# Altium footprint library Master.PcbLib: 178 footprints (part 2 of 12)
Each footprint in its own frame and in the unit in brackets; x right, y up, seen from the top. Pads: shape width x height; smd on the part's side, far side on the other; paste and mask are expansions set on the pad; w line width, h text height; cw(c..) or ccw(c..) is an arc to the next point about the centre after c.
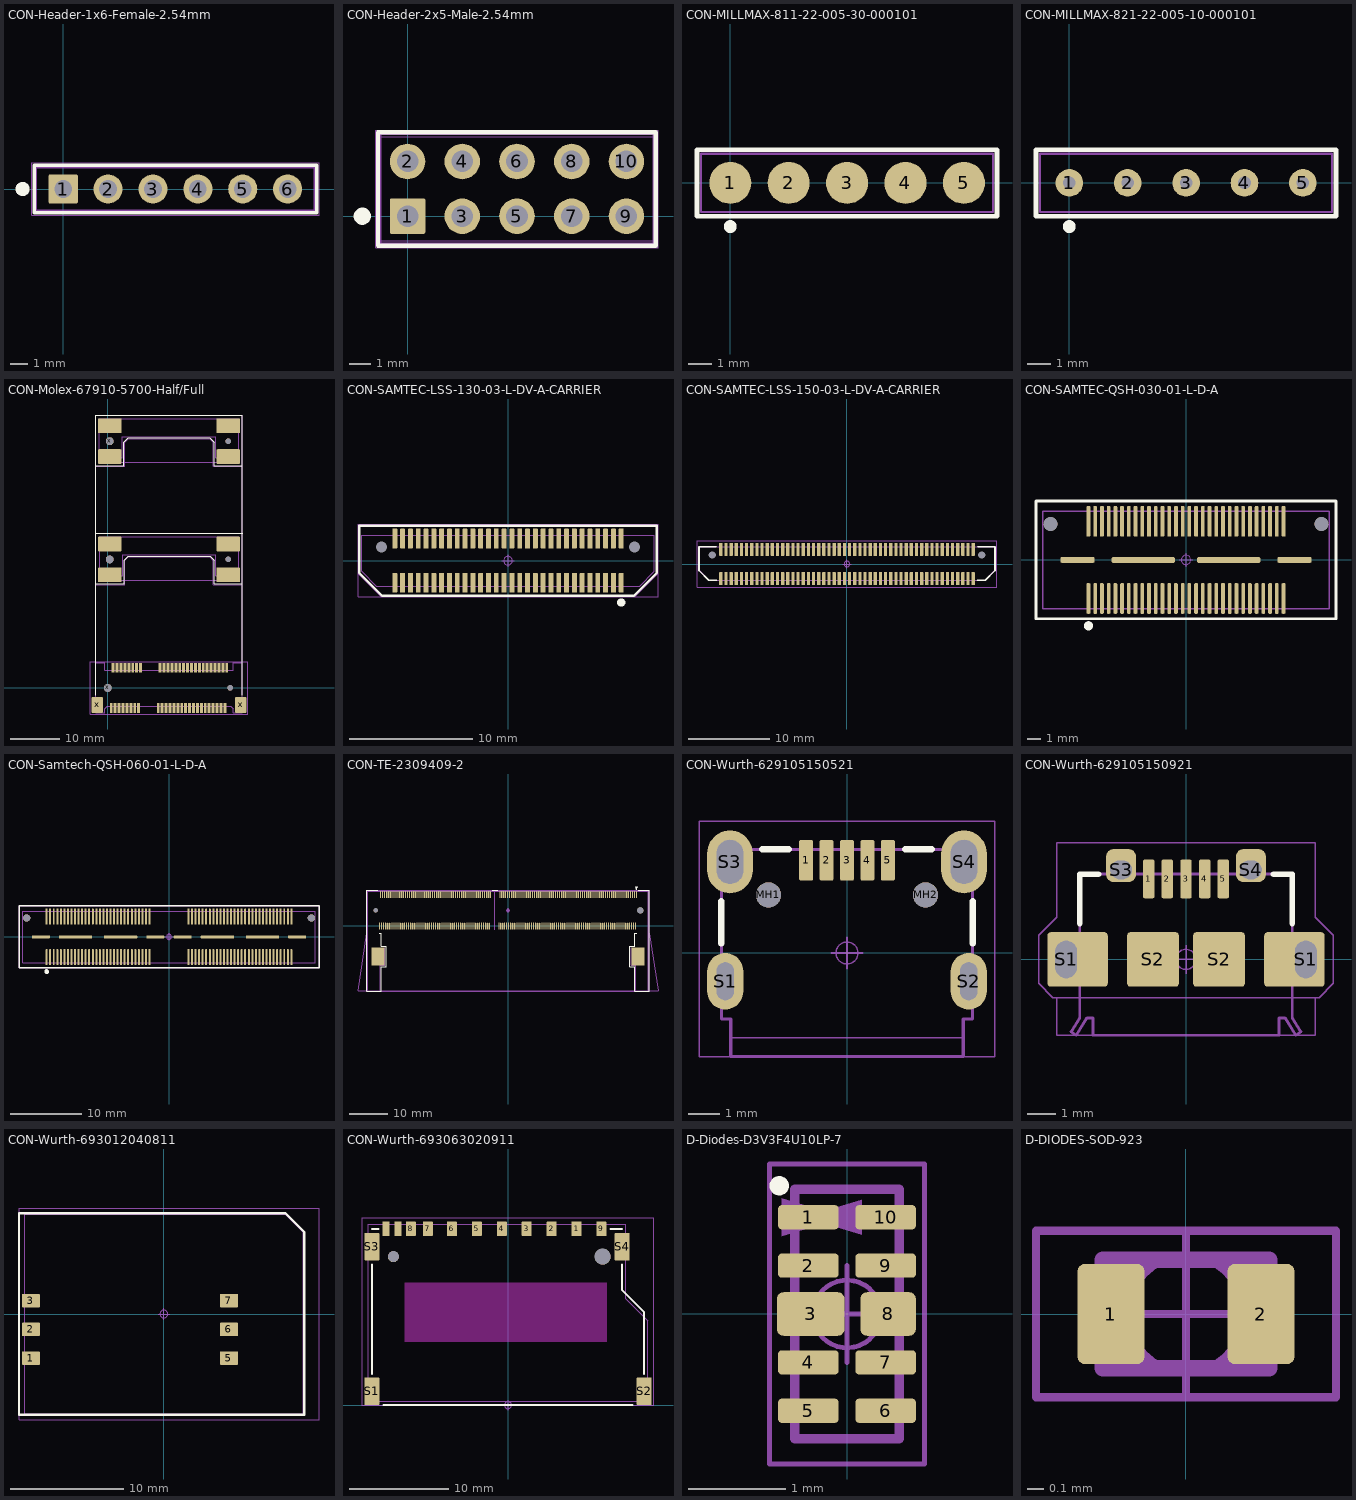
[diagram p1: the footprints below, top view; thin cyan lines are the x and y axes]

## CON-Header-1x6-Female-2.54mm [mm]
pads (6):
  rrect10% 1.65x1.65 hole 1: 1(0,0)
  round 1.65 hole 1: 2(2.54,0) 3(5.08,0) 4(7.62,0) 5(10.16,0) 6(12.7,0)
Top Overlay:
  circle w0.4: c-2.3,0 r0.2
  lines w0.2: -1.65,-1.355 14.35,-1.355 14.35,1.355 -1.65,1.355 -1.65,-1.355
Top Component Outline:
  lines w0.05: -1.775,-1.48 14.475,-1.48 14.475,1.48 -1.775,1.48 -1.775,-1.48
Top 3D Body:
  lines w0.01: -1.525,-1.205 -1.525,1.205 14.225,1.205 14.225,-1.205 -1.525,-1.205
Top Component Center:
  circle w0.05: c0,0 r0.35
  lines w0.05: -0.5,0 0.5,0 ; 0,-0.5 0,0.5
Top Dimensions:
  lines w0.1: -1.525,-1.205 -1.525,1.205 14.225,1.205 14.225,-1.205 -1.525,-1.205
Top Assembly:
  text ".Designator" at 4.7,1.75 h0.75
3D body "Samtec-SSW-106-01-G-S.step": height 8.52, standoff -2.63, extent -1.524,-1.206 14.224,1.207

## CON-Header-2x5-Male-2.54mm [mm] "2.54 mm header"
height 10.8
pads (10):
  rrect10% 1.65x1.65 hole 1: 1(0,0)
  round 1.65 hole 1: 2(0,2.54) 3(2.54,0) 4(2.54,2.54) 5(5.08,0) 6(5.08,2.54) 7(7.62,0) 8(7.62,2.54) 9(10.16,0) 10(10.16,2.54)
Top Overlay:
  circle w0.4: c-2.1,0 r0.2
  lines w0.2: -1.375,-1.375 -1.375,3.9 11.525,3.9 11.525,-1.375 -1.375,-1.375
Top Component Outline:
  lines w0.05: -1.475,-1.475 -1.475,4 11.625,4 11.625,-1.475 -1.475,-1.475
Top 3D Body:
  lines w0.001: -1.27,-1.14 -1.27,3.68 11.43,3.68 11.43,-1.14 -1.27,-1.14
Top Component Center:
  circle w0.05: c0,0 r0.35
  lines w0.05: -0.5,0 0.5,0 ; 0,-0.5 0,0.5
Top Dimensions:
  lines w0.1: -1.27,-1.27 -1.27,3.81 11.43,3.81 11.43,-1.27 -1.27,-1.27
Top Assembly:
  text ".Designator" at 3.391,1.1 h0.75
3D body "Samtec-TSW-105-07-G-D.step": height 8.4, standoff -2.52, extent -1.27,-1.27 11.43,3.81

## CON-MILLMAX-811-22-005-30-000101 [mm]
pads (5):
  round 1.83 smd: 1(0,0) 2(2.54,0) 3(5.08,0) 4(7.62,0) 5(10.16,0)
Top Overlay:
  circle w0.4: c0,-1.9 r0.08
  lines w0.2: -1.448,-1.448 -1.448,1.448 11.6,1.448 11.6,-1.448 -1.448,-1.448
Top Component Outline:
  lines w0.05: -1.448,-1.448 -1.448,1.448 11.6,1.448 11.6,-1.448 -1.448,-1.448
Top 3D Body:
  lines w0.01: -1.27,-1.27 11.43,-1.27 11.43,1.27 -1.27,1.27 -1.27,-1.27
Top Component Center:
  circle w0.05: c0,0 r0.35
  lines w0.05: -0.5,0 0.5,0 ; 0,-0.5 0,0.5
Top Dimensions:
  lines w0.1: -1.27,-1.27 11.43,-1.27 11.43,1.27 -1.27,1.27 -1.27,-1.27
Top Assembly:
  text ".Designator" at -0.483,1.803 h0.75
3D body "mill-max-811-22-005-30-000101.step": height 3.49, standoff 0.01, extent -1.27,-1.27 11.43,1.27

## CON-MILLMAX-821-22-005-10-000101 [mm]
pads (5):
  round 1.2 hole 0.55: 1(0,0) 2(2.54,0) 3(5.08,0) 4(7.62,0) 5(10.16,0)
Top Overlay:
  circle w0.4: c0,-1.9 r0.08
  lines w0.2: -1.448,-1.448 -1.448,1.448 11.6,1.448 11.6,-1.448 -1.448,-1.448
Top Component Outline:
  lines w0.1: -1.448,-1.448 -1.448,1.448 11.6,1.448 11.6,-1.448 -1.448,-1.448
Top 3D Body:
  lines w0.01: -1.27,-1.27 11.43,-1.27 11.43,1.27 -1.27,1.27 -1.27,-1.27
Top Component Center:
  circle w0.05: c0,0 r0.35
  lines w0.05: -0.5,0 0.5,0 ; 0,-0.5 0,0.5
Top Dimensions:
  lines w0.1: -1.27,-1.27 11.43,-1.27 11.43,1.27 -1.27,1.27 -1.27,-1.27
Top Assembly:
  text ".Designator" at -0.483,1.803 h0.75
3D body "mill-max-821-22-005-10-000101.STEP": height 3.49, standoff -1.74, extent -1.27,-1.27 11.43,1.27

## CON-Molex-67910-5700-Half/Full [mm]
pads (68):
  rrect12% 0.6x2 smd: 1(0.7,-4.1) 2(1.1,4.1) 3(1.5,-4.1) 4(1.9,4.1) 5(2.3,-4.1) 6(2.7,4.1) 7(3.1,-4.1) 8(3.5,4.1) 9(3.9,-4.1) 10(4.3,4.1) 11(4.7,-4.1) 12(5.1,4.1) 13(5.5,-4.1) 14(5.9,4.1) 15(6.3,-4.1) 16(6.7,4.1) 17(10.3,-4.1) 18(10.7,4.1) 19(11.1,-4.1) 20(11.5,4.1) 21(11.9,-4.1) 22(12.3,4.1) 23(12.7,-4.1) 24(13.1,4.1) 25(13.5,-4.1) 26(13.9,4.1) 27(14.3,-4.1) 28(14.7,4.1) 29(15.1,-4.1) 30(15.5,4.1) 31(15.9,-4.1) 32(16.3,4.1) 33(16.7,-4.1) 34(17.1,4.1) 35(17.5,-4.1) 36(17.9,4.1) 37(18.3,-4.1) 38(18.7,4.1) 39(19.1,-4.1) 40(19.5,4.1) 41(19.9,-4.1) 42(20.3,4.1) 43(20.7,-4.1) 44(21.1,4.1) 45(21.5,-4.1) 46(21.9,4.1) 47(22.3,-4.1) 48(22.7,4.1) 49(23.1,-4.1) 50(23.5,4.1) 51(23.9,-4.1) 52(24.3,4.1)
  rrect12% 2.3x3.2 smd: x(-2.15,-3.5) x(27.15,-3.5)
  round 1.6 hole 1.6 unplated: x(0,0) x(0.4,50.4) ""(0.4,26.25)
  round 1.1 hole 1.1 unplated: x(24.6,50.4) x(25,0) ""(24.6,26.25)
  rrect12% 4.8x3 smd: ""(0.4,23.1) ""(0.4,29.4) ""(0.4,47.25) ""(0.4,53.55) ""(24.6,23.1) ""(24.6,29.4) ""(24.6,47.25) ""(24.6,53.55)
Top Overlay:
  lines w0.2: -2.5,-1.5 -2.5,55.725 27.5,55.725 27.5,-1.5 ; -2.5,21.264 3.332,21.264 3.332,26.077 4.168,26.914 20.896,26.914 21.732,26.077 21.732,21.264 27.382,21.264 ; -2.468,31.589 27.532,31.589 ; -2.35,45.4 3.3,45.4 3.3,50.214 4.136,51.05 20.864,51.05 21.7,50.214 21.7,45.4 27.35,45.4
Top Component Outline:
  lines w0.05: -2.5,5.334 -2.5,45.25 ; -2.5,21.114 3.482,21.114 3.482,26.024 4.221,26.764 20.836,26.764 21.582,26.018 21.582,21.114 27.5,21.114 ; -2.5,31.591 27.5,31.591 ; 27.5,5.334 27.5,45.25 ; -2.5,45.25 -2.5,55.728 27.5,55.728 27.5,45.25 ; -2.5,45.25 3.45,45.25 3.45,50.161 4.189,50.9 20.804,50.9 21.55,50.154 21.55,45.25 27.5,45.25 ; -3.556,-5.334 28.575,-5.334 28.575,5.334 -3.556,5.334 -3.556,-5.334
Top 3D Body:
  lines w0.001: 0.9,47.05 0.9,46.24 2.5,46.24 2.5,47.05 ; 0.932,22.914 0.932,22.104 2.532,22.104 2.532,22.914 ; 22.5,47.05 22.5,46.24 24.1,46.24 24.1,47.05 ; 22.532,22.914 22.532,22.104 24.132,22.104 24.132,22.914 ; -2.5,5.1 -0.625,5.1 -0.625,3.6 25.625,3.6 25.625,5.1 ; -2.5,5.1 -2.5,5.1 ; -2.5,5.1 -2.5,-5.1 -0.625,-5.1 -0.625,-4.25 -0.125,-3.75 25.125,-3.75 25.625,-4.25 25.625,-5.1 27.5,-5.1 ; -1.725,47.05 3,47.05 3,51.33 22,51.33 22,47.05 26.725,47.05 ; -1.725,47.05 -1.725,55 26.725,55 26.725,47.05 ; -1.725,47.05 -1.725,46.09 26.725,46.09 26.725,47.05 ; -1.693,22.914 -1.693,21.954 26.757,21.954 26.757,22.914 ; -1.693,22.914 -1.693,30.864 26.757,30.864 26.757,22.914 ; -1.693,22.914 3.032,22.914 3.032,27.194 22.032,27.194 22.032,22.914 26.757,22.914 ; 25.625,5.1 27.5,5.1 27.5,-5.1 ; 25.625,5.1 25.625,5.1 ; 27.5,-5.1 27.5,-5.1
Top Component Center:
  circle w0.05: c0,0 r0.35
  lines w0.05: -0.5,0 0.5,0 ; 0,-0.5 0,0.5
Top Dimensions:
  lines w0.1: 0.9,47.05 0.9,46.24 2.5,46.24 2.5,47.05 ; 0.932,22.914 0.932,22.104 2.532,22.104 2.532,22.914 ; 22.5,47.05 22.5,46.24 24.1,46.24 24.1,47.05 ; 22.532,22.914 22.532,22.104 24.132,22.104 24.132,22.914 ; -2.5,5.1 -0.625,5.1 -0.625,3.6 25.625,3.6 25.625,5.1 ; -2.5,5.1 -2.5,-5.1 -0.625,-5.1 -0.625,-4.25 -0.125,-3.75 25.125,-3.75 25.625,-4.25 25.625,-5.1 27.5,-5.1 ; -2.5,5.1 -2.5,5.1 ; 25.625,5.1 27.5,5.1 27.5,-5.1 ; 25.625,5.1 25.625,5.1 ; 27.5,-5.1 27.5,-5.1 ; -1.725,47.05 3,47.05 3,51.33 22,51.33 22,47.05 26.725,47.05 26.725,55 -1.725,55 -1.725,47.05 ; -1.693,22.914 -1.693,30.864 26.757,30.864 26.757,22.914 22.032,22.914 22.032,27.194 3.032,27.194 3.032,22.914 -1.693,22.914
Top Assembly:
  text ".Designator" at -3.099,-5.944 h0.75
3D body "679105700.stp": height 5.77, standoff -0.73, extent -2.5,-5.1 27.5,5.1

## CON-SAMTEC-LSS-130-03-L-DV-A-CARRIER [mm] "0.635 mm Razor Beam High-Speed Hermaphroditic Terminal/Socket Strip"
height 5.49
pads (62):
  rrect20% 0.4x1.6 smd: 1(9.207,-1.8) 2(9.207,1.8) 3(8.572,-1.8) 4(8.572,1.8) 5(7.938,-1.8) 6(7.938,1.8) 7(7.302,-1.8) 8(7.302,1.8) 9(6.667,-1.8) 10(6.667,1.8) 11(6.032,-1.8) 12(6.032,1.8) 13(5.397,-1.8) 14(5.397,1.8) 15(4.763,-1.8) 16(4.763,1.8) 17(4.127,-1.8) 18(4.127,1.8) 19(3.492,-1.8) 20(3.492,1.8) 21(2.857,-1.8) 22(2.857,1.8) 23(2.222,-1.8) 24(2.222,1.8) 25(1.587,-1.8) 26(1.587,1.8) 27(0.953,-1.8) 28(0.953,1.8) 29(0.318,-1.8) 30(0.318,1.8) 31(-0.318,-1.8) 32(-0.318,1.8) 33(-0.953,-1.8) 34(-0.953,1.8) 35(-1.587,-1.8) 36(-1.587,1.8) 37(-2.222,-1.8) 38(-2.222,1.8) 39(-2.857,-1.8) 40(-2.857,1.8) 41(-3.492,-1.8) 42(-3.492,1.8) 43(-4.127,-1.8) 44(-4.127,1.8) 45(-4.763,-1.8) 46(-4.763,1.8) 47(-5.397,-1.8) 48(-5.397,1.8) 49(-6.032,-1.8) 50(-6.032,1.8) 51(-6.667,-1.8) 52(-6.667,1.8) 53(-7.302,-1.8) 54(-7.302,1.8) 55(-7.938,-1.8) 56(-7.938,1.8) 57(-8.572,-1.8) 58(-8.572,1.8) 59(-9.207,-1.8) 60(-9.207,1.8)
  round 0 hole 0.9 unplated mask+0.55: ""(-10.275,1.1) ""(10.275,1.1)
Top Overlay:
  circle w0.5: c9.2,-3.4 r0.088
  lines w0.2: -12.1,-1 -12.1,2.85 12.1,2.85 12.1,-1 10.246,-2.854 -10.246,-2.854 -12.1,-1
Top Component Outline:
  lines w0.05: -12.2,-1.05 -10.313,-2.937 ; 10.313,-2.937 12.2,-1.05 ; -12.2,-2.95 12.2,-2.95 12.2,2.95 -12.2,2.95 -12.2,-2.95
Top 3D Body:
  lines w0.001: -11.9,-0.87 -10.7,-2.07 10.7,-2.07 11.9,-0.87 11.9,2.07 -11.9,2.07 -11.9,-0.87
Top Component Center:
  circle w0.05: c0,0 r0.35
  lines w0.05: -0.5,0 0.5,0 ; 0,-0.5 0,0.5
Top Dimensions:
  lines w0.1: -11.9,-0.87 -10.7,-2.07 10.7,-2.07 11.9,-0.87 11.9,2.07 -11.9,2.07 -11.9,-0.87
Top Assembly:
  text ".Designator" at -1.689,-0.17 h0.75
3D body "LSS-130-03-L-DV-A.stp": height 5.46, standoff -0.84, extent -11.898,-2.3 11.903,2.3

## CON-SAMTEC-LSS-150-03-L-DV-A-CARRIER [mm] "0.635 mm Razor Beam High-Speed Hermaphroditic Terminal/Socket Strip"
height 5.49
pads (102):
  rrect20% 0.4x1.6 smd: 1(15.558,-1.8) 2(15.558,1.8) 3(14.923,-1.8) 4(14.923,1.8) 5(14.288,-1.8) 6(14.288,1.8) 7(13.653,-1.8) 8(13.653,1.8) 9(13.018,-1.8) 10(13.018,1.8) 11(12.383,-1.8) 12(12.383,1.8) 13(11.748,-1.8) 14(11.748,1.8) 15(11.113,-1.8) 16(11.113,1.8) 17(10.478,-1.8) 18(10.478,1.8) 19(9.843,-1.8) 20(9.843,1.8) 21(9.208,-1.8) 22(9.208,1.8) 23(8.573,-1.8) 24(8.573,1.8) 25(7.938,-1.8) 26(7.938,1.8) 27(7.303,-1.8) 28(7.303,1.8) 29(6.668,-1.8) 30(6.668,1.8) 31(6.033,-1.8) 32(6.033,1.8) 33(5.398,-1.8) 34(5.398,1.8) 35(4.763,-1.8) 36(4.763,1.8) 37(4.128,-1.8) 38(4.128,1.8) 39(3.493,-1.8) 40(3.493,1.8) 41(2.858,-1.8) 42(2.858,1.8) 43(2.223,-1.8) 44(2.223,1.8) 45(1.588,-1.8) 46(1.588,1.8) 47(0.953,-1.8) 48(0.953,1.8) 49(0.318,-1.8) 50(0.318,1.8) 51(-0.317,-1.8) 52(-0.317,1.8) 53(-0.952,-1.8) 54(-0.952,1.8) 55(-1.587,-1.8) 56(-1.587,1.8) 57(-2.222,-1.8) 58(-2.222,1.8) 59(-2.857,-1.8) 60(-2.857,1.8) 61(-3.492,-1.8) 62(-3.492,1.8) 63(-4.127,-1.8) 64(-4.127,1.8) 65(-4.762,-1.8) 66(-4.762,1.8) 67(-5.397,-1.8) 68(-5.397,1.8) 69(-6.032,-1.8) 70(-6.032,1.8) 71(-6.667,-1.8) 72(-6.667,1.8) 73(-7.302,-1.8) 74(-7.302,1.8) 75(-7.937,-1.8) 76(-7.937,1.8) 77(-8.572,-1.8) 78(-8.572,1.8) 79(-9.207,-1.8) 80(-9.207,1.8) 81(-9.842,-1.8) 82(-9.842,1.8) 83(-10.477,-1.8) 84(-10.477,1.8) 85(-11.112,-1.8) 86(-11.112,1.8) 87(-11.747,-1.8) 88(-11.747,1.8) 89(-12.382,-1.8) 90(-12.382,1.8) 91(-13.017,-1.8) 92(-13.017,1.8) 93(-13.652,-1.8) 94(-13.652,1.8) 95(-14.287,-1.8) 96(-14.287,1.8) 97(-14.922,-1.8) 98(-14.922,1.8) 99(-15.557,-1.8) 100(-15.557,1.8)
  round 0 hole 0.9 unplated mask+0.55: ""(-16.625,1.1) ""(16.625,1.1)
Top Overlay:
  lines w0.2: -18.25,2.14 -16.107,2.14 ; -18.235,2.14 -18.25,2.125 -18.25,-0.809 -17.059,-2 -16.1,-2 ; 16.1,-2 17.059,-2 18.25,-0.809 18.25,2.125 18.235,2.14 ; 16.108,2.14 18.25,2.14
Top Component Outline:
  lines w0.05: -18.5,-2.85 -18.5,2.85 18.5,2.85 18.5,-2.85 -18.5,-2.85
Top 3D Body:
  lines w0.001: -18.25,2.14 18.25,2.14 ; -18.25,2.14 18.25,2.14 ; -18.25,2.14 -18.25,-0.8 -17.05,-2 17.05,-2 18.25,-0.8 18.25,2.14
Top Component Center:
  circle w0.05: c0,0 r0.35
  lines w0.05: -0.5,0 0.5,0 ; 0,-0.5 0,0.5
Top Dimensions:
  lines w0.1: -18.25,2.14 18.25,2.14 ; -18.25,2.14 18.25,2.14 ; -18.25,2.14 -18.25,-0.8 -17.05,-2 17.05,-2 18.25,-0.8 18.25,2.14
Top Assembly:
  text ".Designator" at -1.689,-0.17 h0.75
3D body "LSS-150-03-L-DV-A.stp": height 5.31, standoff -0.99, extent -18.247,-2.3 18.253,2.3

## CON-SAMTEC-QSH-030-01-L-D-A [mm]
pads (66):
  rrect50% 0.28x2.27 smd: 1(-7.25,-2.865) 2(-7.25,2.865) 3(-6.75,-2.865) 4(-6.75,2.865) 5(-6.25,-2.865) 6(-6.25,2.865) 7(-5.75,-2.865) 8(-5.75,2.865) 9(-5.25,-2.865) 10(-5.25,2.865) 11(-4.75,-2.865) 12(-4.75,2.865) 13(-4.25,-2.865) 14(-4.25,2.865) 15(-3.75,-2.865) 16(-3.75,2.865) 17(-3.25,-2.865) 18(-3.25,2.865) 19(-2.75,-2.865) 20(-2.75,2.865) 21(-2.25,-2.865) 22(-2.25,2.865) 23(-1.75,-2.865) 24(-1.75,2.865) 25(-1.25,-2.865) 26(-1.25,2.865) 27(-0.75,-2.865) 28(-0.75,2.865) 29(-0.25,-2.865) 30(-0.25,2.865) 31(0.25,-2.865) 32(0.25,2.865) 33(0.75,-2.865) 34(0.75,2.865) 35(1.25,-2.865) 36(1.25,2.865) 37(1.75,-2.865) 38(1.75,2.865) 39(2.25,-2.865) 40(2.25,2.865) 41(2.75,-2.865) 42(2.75,2.865) 43(3.25,-2.865) 44(3.25,2.865) 45(3.75,-2.865) 46(3.75,2.865) 47(4.25,-2.865) 48(4.25,2.865) 49(4.75,-2.865) 50(4.75,2.865) 51(5.25,-2.865) 52(5.25,2.865) 53(5.75,-2.865) 54(5.75,2.865) 55(6.25,-2.865) 56(6.25,2.865) 57(6.75,-2.865) 58(6.75,2.865) 59(7.25,-2.865) 60(7.25,2.865)
  rrect50% 2.54x0.43 smd: 61(-8.065,0) 61(8.065,0)
  rrect50% 4.7x0.43 smd: 61(-3.175,0) 61(3.175,0)
  round 1.02 hole 1.02 unplated: ""(-10.065,2.67) ""(10.065,2.67)
Top Overlay:
  circle w0.5: c-7.25,-4.895 r0.088
  lines w0.2: -11.15,-4.38 11.15,-4.38 11.15,4.38 -11.15,4.38 -11.15,-4.38
Top Component Outline:
  lines w0.05: -11.15,-4.38 -11.15,4.38 11.15,4.38 11.15,-4.38 -11.15,-4.38
Top 3D Body:
  lines w0.01: -10.65,-3.62 10.65,-3.62 10.65,3.62 -10.65,3.62 -10.65,-3.62
Top Component Center:
  circle w0.05: c0,0 r0.35
  lines w0.05: -0.5,0 0.5,0 ; 0,-0.5 0,0.5
Top Dimensions:
  lines w0.1: -10.65,-3.62 -10.65,3.62 10.65,3.62 10.65,-3.62 -10.65,-3.62
Top Assembly:
  text ".Designator" at 8.527,-5.207 h0.75
3D body "QSH-030-01-L-D-A.stp": height 3.24, standoff -0.76, extent -10.65,-3.744 10.661,3.75

## CON-Samtech-QSH-060-01-L-D-A [mm]
pads (130):
  rrect50% 0.28x2.27 smd: 1(-17.25,-2.865) 2(-17.25,2.865) 3(-16.75,-2.865) 4(-16.75,2.865) 5(-16.25,-2.865) 6(-16.25,2.865) 7(-15.75,-2.865) 8(-15.75,2.865) 9(-15.25,-2.865) 10(-15.25,2.865) 11(-14.75,-2.865) 12(-14.75,2.865) 13(-14.25,-2.865) 14(-14.25,2.865) 15(-13.75,-2.865) 16(-13.75,2.865) 17(-13.25,-2.865) 18(-13.25,2.865) 19(-12.75,-2.865) 20(-12.75,2.865) 21(-12.25,-2.865) 22(-12.25,2.865) 23(-11.75,-2.865) 24(-11.75,2.865) 25(-11.25,-2.865) 26(-11.25,2.865) 27(-10.75,-2.865) 28(-10.75,2.865) 29(-10.25,-2.865) 30(-10.25,2.865) 31(-9.75,-2.865) 32(-9.75,2.865) 33(-9.25,-2.865) 34(-9.25,2.865) 35(-8.75,-2.865) 36(-8.75,2.865) 37(-8.25,-2.865) 38(-8.25,2.865) 39(-7.75,-2.865) 40(-7.75,2.865) 41(-7.25,-2.865) 42(-7.25,2.865) 43(-6.75,-2.865) 44(-6.75,2.865) 45(-6.25,-2.865) 46(-6.25,2.865) 47(-5.75,-2.865) 48(-5.75,2.865) 49(-5.25,-2.865) 50(-5.25,2.865) 51(-4.75,-2.865) 52(-4.75,2.865) 53(-4.25,-2.865) 54(-4.25,2.865) 55(-3.75,-2.865) 56(-3.75,2.865) 57(-3.25,-2.865) 58(-3.25,2.865) 59(-2.75,-2.865) 60(-2.75,2.865) 61(2.75,-2.865) 62(2.75,2.865) 63(3.25,-2.865) 64(3.25,2.865) 65(3.75,-2.865) 66(3.75,2.865) 67(4.25,-2.865) 68(4.25,2.865) 69(4.75,-2.865) 70(4.75,2.865) 71(5.25,-2.865) 72(5.25,2.865) 73(5.75,-2.865) 74(5.75,2.865) 75(6.25,-2.865) 76(6.25,2.865) 77(6.75,-2.865) 78(6.75,2.865) 79(7.25,-2.865) 80(7.25,2.865) 81(7.75,-2.865) 82(7.75,2.865) 83(8.25,-2.865) 84(8.25,2.865) 85(8.75,-2.865) 86(8.75,2.865) 87(9.25,-2.865) 88(9.25,2.865) 89(9.75,-2.865) 90(9.75,2.865) 91(10.25,-2.865) 92(10.25,2.865) 93(10.75,-2.865) 94(10.75,2.865) 95(11.25,-2.865) 96(11.25,2.865) 97(11.75,-2.865) 98(11.75,2.865) 99(12.25,-2.865) 100(12.25,2.865) 101(12.75,-2.865) 102(12.75,2.865) 103(13.25,-2.865) 104(13.25,2.865) 105(13.75,-2.865) 106(13.75,2.865) 107(14.25,-2.865) 108(14.25,2.865) 109(14.75,-2.865) 110(14.75,2.865) 111(15.25,-2.865) 112(15.25,2.865) 113(15.75,-2.865) 114(15.75,2.865) 115(16.25,-2.865) 116(16.25,2.865) 117(16.75,-2.865) 118(16.75,2.865) 119(17.25,-2.865) 120(17.25,2.865)
  rrect50% 2.54x0.43 smd: 121(-18.065,0) 121(-1.935,0) 121(1.935,0) 121(18.065,0)
  rrect50% 4.7x0.43 smd: 121(-13.175,0) 121(-6.825,0) 121(6.825,0) 121(13.175,0)
  round 1.02 hole 1.02 unplated: ""(-20.065,2.67) ""(20.065,2.67)
Top Overlay:
  circle w0.5: c-17.25,-4.895 r0.088
  lines w0.2: -21.15,-4.38 21.15,-4.38 21.15,4.38 -21.15,4.38 -21.15,-4.38
Top Component Outline:
  lines w0.05: -21.15,-4.38 -21.15,4.38 21.15,4.38 21.15,-4.38 -21.15,-4.38
Top 3D Body:
  lines w0.01: -20.65,-3.62 20.65,-3.62 20.65,3.62 -20.65,3.62 -20.65,-3.62
Top Component Center:
  circle w0.05: c0,0 r0.35
  lines w0.05: -0.5,0 0.5,0 ; 0,-0.5 0,0.5
Top Dimensions:
  lines w0.1: -20.65,-3.62 -20.65,3.62 20.65,3.62 20.65,-3.62 -20.65,-3.62
Top Assembly:
  text ".Designator" at -1.473,-5.207 h0.75
3D body "QSH-060-01-X-D-A-K.STEP": height 3.27, standoff -0.29, extent -20.637,-3.746 20.638,3.747

## CON-TE-2309409-2 [mm]
pads (264):
  rrect50% 0.3x1.75 smd: 1(33.375,8.05) 2(33.125,-0.15) 3(32.875,8.05) 4(32.625,-0.15) 5(32.375,8.05) 6(32.125,-0.15) 7(31.875,8.05) 8(31.625,-0.15) 9(31.375,8.05) 10(31.125,-0.15) 11(30.875,8.05) 12(30.625,-0.15) 13(30.375,8.05) 14(30.125,-0.15) 15(29.875,8.05) 16(29.625,-0.15) 17(29.375,8.05) 18(29.125,-0.15) 19(28.875,8.05) 20(28.625,-0.15) 21(28.375,8.05) 22(28.125,-0.15) 23(27.875,8.05) 24(27.625,-0.15) 25(27.375,8.05) 26(27.125,-0.15) 27(26.875,8.05) 28(26.625,-0.15) 29(26.375,8.05) 30(26.125,-0.15) 31(25.875,8.05) 32(25.625,-0.15) 33(25.375,8.05) 34(25.125,-0.15) 35(24.875,8.05) 36(24.625,-0.15) 37(24.375,8.05) 38(24.125,-0.15) 39(23.875,8.05) 40(23.625,-0.15) 41(23.375,8.05) 42(23.125,-0.15) 43(22.875,8.05) 44(22.625,-0.15) 45(22.375,8.05) 46(22.125,-0.15) 47(21.875,8.05) 48(21.625,-0.15) 49(21.375,8.05) 50(21.125,-0.15) 51(20.875,8.05) 52(20.625,-0.15) 53(20.375,8.05) 54(20.125,-0.15) 55(19.875,8.05) 56(19.625,-0.15) 57(19.375,8.05) 58(19.125,-0.15) 59(18.875,8.05) 60(18.625,-0.15) 61(18.375,8.05) 62(18.125,-0.15) 63(17.875,8.05) 64(17.625,-0.15) 65(17.375,8.05) 66(17.125,-0.15) 67(16.875,8.05) 68(16.625,-0.15) 69(16.375,8.05) 70(16.125,-0.15) 71(15.875,8.05) 72(15.625,-0.15) 73(15.375,8.05) 74(15.125,-0.15) 75(14.875,8.05) 76(14.625,-0.15) 77(14.375,8.05) 78(14.125,-0.15) 79(13.875,8.05) 80(13.625,-0.15) 81(13.375,8.05) 82(13.125,-0.15) 83(12.875,8.05) 84(12.625,-0.15) 85(12.375,8.05) 86(12.125,-0.15) 87(11.875,8.05) 88(11.625,-0.15) 89(11.375,8.05) 90(11.125,-0.15) 91(10.875,8.05) 92(10.625,-0.15) 93(10.375,8.05) 94(10.125,-0.15) 95(9.875,8.05) 96(9.625,-0.15) 97(9.375,8.05) 98(9.125,-0.15) 99(8.875,8.05) 100(8.625,-0.15) 101(8.375,8.05) 102(8.125,-0.15) 103(7.875,8.05) 104(7.625,-0.15) 105(7.375,8.05) 106(7.125,-0.15) 107(6.875,8.05) 108(6.625,-0.15) 109(6.375,8.05) 110(6.125,-0.15) 111(5.875,8.05) 112(5.625,-0.15) 113(5.375,8.05) 114(5.125,-0.15) 115(4.875,8.05) 116(4.625,-0.15) 117(4.375,8.05) 118(4.125,-0.15) 119(3.875,8.05) 120(3.625,-0.15) 121(3.375,8.05) 122(3.125,-0.15) 123(2.875,8.05) 124(2.625,-0.15) 125(2.375,8.05) 126(2.125,-0.15) 127(1.875,8.05) 128(1.625,-0.15) 129(1.375,8.05) 130(1.125,-0.15) 131(0.875,8.05) 132(0.625,-0.15) 133(0.375,8.05) 134(0.125,-0.15) 135(-0.125,8.05) 136(-0.375,-0.15) 137(-0.625,8.05) 138(-0.875,-0.15) 139(-1.125,8.05) 140(-1.375,-0.15) 141(-1.625,8.05) 142(-1.875,-0.15) 143(-2.125,8.05) 144(-2.375,-0.15) 145(-4.625,8.05) 146(-4.875,-0.15) 147(-5.125,8.05) 148(-5.375,-0.15) 149(-5.625,8.05) 150(-5.875,-0.15) 151(-6.125,8.05) 152(-6.375,-0.15) 153(-6.625,8.05) 154(-6.875,-0.15) 155(-7.125,8.05) 156(-7.375,-0.15) 157(-7.625,8.05) 158(-7.875,-0.15) 159(-8.125,8.05) 160(-8.375,-0.15) 161(-8.625,8.05) 162(-8.875,-0.15) 163(-9.125,8.05) 164(-9.375,-0.15) 165(-9.625,8.05) 166(-9.875,-0.15) 167(-10.125,8.05) 168(-10.375,-0.15) 169(-10.625,8.05) 170(-10.875,-0.15) 171(-11.125,8.05) 172(-11.375,-0.15) 173(-11.625,8.05) 174(-11.875,-0.15) 175(-12.125,8.05) 176(-12.375,-0.15) 177(-12.625,8.05) 178(-12.875,-0.15) 179(-13.125,8.05) 180(-13.375,-0.15) 181(-13.625,8.05) 182(-13.875,-0.15) 183(-14.125,8.05) 184(-14.375,-0.15) 185(-14.625,8.05) 186(-14.875,-0.15) 187(-15.125,8.05) 188(-15.375,-0.15) 189(-15.625,8.05) 190(-15.875,-0.15) 191(-16.125,8.05) 192(-16.375,-0.15) 193(-16.625,8.05) 194(-16.875,-0.15) 195(-17.125,8.05) 196(-17.375,-0.15) 197(-17.625,8.05) 198(-17.875,-0.15) 199(-18.125,8.05) 200(-18.375,-0.15) 201(-18.625,8.05) 202(-18.875,-0.15) 203(-19.125,8.05) 204(-19.375,-0.15) 205(-19.625,8.05) 206(-19.875,-0.15) 207(-20.125,8.05) 208(-20.375,-0.15) 209(-20.625,8.05) 210(-20.875,-0.15) 211(-21.125,8.05) 212(-21.375,-0.15) 213(-21.625,8.05) 214(-21.875,-0.15) 215(-22.125,8.05) 216(-22.375,-0.15) 217(-22.625,8.05) 218(-22.875,-0.15) 219(-23.125,8.05) 220(-23.375,-0.15) 221(-23.625,8.05) 222(-23.875,-0.15) 223(-24.125,8.05) 224(-24.375,-0.15) 225(-24.625,8.05) 226(-24.875,-0.15) 227(-25.125,8.05) 228(-25.375,-0.15) 229(-25.625,8.05) 230(-25.875,-0.15) 231(-26.125,8.05) 232(-26.375,-0.15) 233(-26.625,8.05) 234(-26.875,-0.15) 235(-27.125,8.05) 236(-27.375,-0.15) 237(-27.625,8.05) 238(-27.875,-0.15) 239(-28.125,8.05) 240(-28.375,-0.15) 241(-28.625,8.05) 242(-28.875,-0.15) 243(-29.125,8.05) 244(-29.375,-0.15) 245(-29.625,8.05) 246(-29.875,-0.15) 247(-30.125,8.05) 248(-30.375,-0.15) 249(-30.625,8.05) 250(-30.875,-0.15) 251(-31.125,8.05) 252(-31.375,-0.15) 253(-31.625,8.05) 254(-31.875,-0.15) 255(-32.125,8.05) 256(-32.375,-0.15) 257(-32.625,8.05) 258(-32.875,-0.15) 259(-33.125,8.05) 260(-33.375,-0.15)
  round 1.1 hole 1.1 unplated: ""(-34.4,3.95)
  rrect10% 3.5x4.6 smd: ""(-33.8,-8.05) ""(33.8,-8.05)
  round 1.6 hole 1.6 unplated: ""(34.4,3.95)
Top Overlay:
  rectangle: 33.197,9.598 33.553,10.15
  lines w0.2: -33.9,9.15 -36.7,9.15 -36.7,-17.15 -33,-17.15 -33,-10.75 -31.7,-10.75 -31.7,-5.35 -33,-5.35 -33,-2.05 -33.5,-2.05 ; -4.1,9.15 -2.7,9.15 ; 33.5,-2.05 33,-2.05 33,-5.35 31.7,-5.35 31.7,-10.75 33,-10.75 33,-17.15 36.7,-17.15 36.7,9.15 33.9,9.15 ; 33.075,10.15 33.675,10.15 33.375,9.35 33.075,10.15
Top Component Outline:
  lines w0.05: -36.7,-17.15 36.7,-17.15 36.7,9.15 -36.7,9.15 -36.7,-17.15
Top 3D Body:
  lines w0.001: -3.5,-1.13 -3.5,8.95 ; 36.5,-16.9 36.5,8.95 -36.5,8.95 -36.5,-2.05 -36.7,-2.05 -39,-16.9 39,-16.9 36.7,-2.05 36.5,-2.05
Top Component Center:
  circle w0.05: c0,3.95 r0.35
  lines w0.05: -0.5,3.95 0.5,3.95 ; 0,3.45 0,4.45
Top Dimensions:
  circle w0.1: c34.4,3.95 r0.381
  lines w0.1: -32.05,-5.75 -32.05,-10.35 -33.23,-10.35 -33.23,-16.9 -36.5,-16.9 -36.5,8.95 36.5,8.95 36.5,-16.9 33.23,-16.9 33.23,-10.35 32.05,-10.35 32.05,-5.75 ; 33.765,3.95 35.035,3.95 ; 34.4,3.315 34.4,4.585
Top Assembly:
  text ".Designator" at 33.409,9.436 h0.75
3D body "c-2309409-2-1-3d.stp": height 5.27, standoff -0.28, extent -36.5,-16.9 36.5,8.95

## CON-Wurth-629105150521 [mm]
pads (11):
  rrect30% 0.45x1.3 smd: 1(-1.3,2.95) 2(-0.65,2.95) 3(0,2.95) 4(0.65,2.95) 5(1.3,2.95)
  round 0.8 hole 0.8 unplated: MH1(-2.5,1.85) MH2(2.5,1.85)
  oval 1.15x1.8 hole 0.55 slot 1.2 at 90 deg: S1(-3.875,-0.9) S2(3.875,-0.9)
  oval 1.45x2 hole 0.85 slot 1.4 at 90 deg: S3(-3.725,2.9) S4(3.725,2.9)
Top Overlay:
  lines w0.2: -4,0.3 -4,1.65 ; -2.7,3.3 -1.85,3.3 ; 1.85,3.3 2.7,3.3 ; 4,0.3 4,1.65
Top Paste:
  region: -4.45,-0.575 -4.45,-0.461 -4.362,-0.249 -4.201,-0.088 -3.989,0 -3.875,0 -3.761,0 -3.549,-0.088 -3.388,-0.249 -3.3,-0.461 -3.3,-0.575 -3.3,-1.225 -3.3,-1.339 -3.388,-1.551 -3.549,-1.712 -3.761,-1.8 -3.875,-1.8 -3.989,-1.8 -4.201,-1.712 -4.362,-1.551 -4.45,-1.339 -4.45,-1.225
  region: 3.3,-0.575 3.3,-0.461 3.388,-0.249 3.549,-0.088 3.761,0 3.875,0 3.989,0 4.201,-0.088 4.362,-0.249 4.45,-0.461 4.45,-0.575 4.45,-1.225 4.45,-1.339 4.362,-1.551 4.201,-1.712 3.989,-1.8 3.875,-1.8 3.761,-1.8 3.549,-1.712 3.388,-1.551 3.3,-1.339 3.3,-1.225
  region: -4.45,3.175 -4.45,3.246 -4.422,3.386 -4.367,3.518 -4.288,3.637 -4.187,3.738 -4.068,3.817 -3.936,3.872 -3.796,3.9 -3.725,3.9 -3.654,3.9 -3.514,3.872 -3.382,3.817 -3.263,3.738 -3.162,3.637 -3.083,3.518 -3.028,3.386 -3,3.246 -3,3.175 -3,2.625 -3,2.554 -3.028,2.414 -3.083,2.282 -3.162,2.163 -3.263,2.062 -3.382,1.983 -3.514,1.928 -3.654,1.9 -3.725,1.9 -3.796,1.9 -3.936,1.928 -4.068,1.983 -4.187,2.062 -4.288,2.163 -4.367,2.282 -4.422,2.414 -4.45,2.554 -4.45,2.625
  region: 3,3.175 3,3.246 3.028,3.386 3.083,3.518 3.162,3.637 3.263,3.738 3.382,3.817 3.514,3.872 3.654,3.9 3.725,3.9 3.796,3.9 3.936,3.872 4.068,3.817 4.187,3.738 4.288,3.637 4.367,3.518 4.422,3.386 4.45,3.246 4.45,3.175 4.45,2.625 4.45,2.554 4.422,2.414 4.367,2.282 4.288,2.163 4.187,2.062 4.068,1.983 3.936,1.928 3.796,1.9 3.725,1.9 3.654,1.9 3.514,1.928 3.382,1.983 3.263,2.062 3.162,2.163 3.083,2.282 3.028,2.414 3,2.554 3,2.625
Top Component Outline:
  lines w0.05: -3.7,-2.7 3.7,-2.7 ; -4.699,-3.3 -4.699,4.191 4.699,4.191 4.699,-3.3 -4.699,-3.3
  text "PCB Edge" at -1.295,-2.438 h0.7
Top 3D Body:
  lines w0.01: -4,-2.1 -4,3.3 4,3.3 4,-2.1 3.7,-2.1 3.7,-3.3 -3.7,-3.3 -3.7,-2.1 -4,-2.1
Top Component Center:
  circle w0.05: c0,0 r0.35
  lines w0.05: -0.5,0 0.5,0 ; 0,-0.5 0,0.5
Top Dimensions:
  lines w0.1: -4,-2.1 -4,3.3 4,3.3 4,-2.1 3.7,-2.1 3.7,-3.3 -3.7,-3.3 -3.7,-2.1 -4,-2.1
Top Assembly:
  text ".Designator" at -2.8,3.625 h0.75
3D body "629105150521.stp": height 2.75, standoff -1.77, extent -4,-3.3 4,3.303

## CON-Wurth-629105150921 [mm]
pads (11):
  rrect30% 0.4x1.35 smd: 1(-1.3,2.805) 2(-0.65,2.805) 3(0,2.805) 4(0.65,2.805) 5(1.3,2.805)
  rrect12% 2.1x1.9 hole 0.75 slot 1.3 at 90 deg copper offset 0.4,0: S1(-4.175,0)
  rrect12% 2.1x1.9 hole 0.75 slot 1.3 at 90 deg copper offset -0.4,0: S1(4.175,0)
  rrect12% 1.8x1.9 smd: S2(-1.15,0) S2(1.15,0)
  rrect50% 1.05x1.15 hole 0.75 slot 0.65 at 90 deg copper offset 0,0.15: S3(-2.26,3.12) S4(2.26,3.12)
Top Overlay:
  lines w0.2: -3.7,1.25 -3.7,2.97 -3.05,2.97 ; 3.05,2.97 3.7,2.97 3.7,1.25
Top Paste:
  region: -2.725,3.587 -2.725,3.627 -2.695,3.701 -2.638,3.757 -2.565,3.787 -2.525,3.787 -2,3.787 -1.96,3.787 -1.887,3.757 -1.83,3.701 -1.8,3.627 -1.8,3.587 -1.8,2.963 -1.8,2.923 -1.83,2.849 -1.887,2.793 -1.96,2.762 -2,2.762 -2.525,2.762 -2.565,2.762 -2.638,2.793 -2.695,2.849 -2.725,2.923 -2.725,2.962
  region: 1.8,3.587 1.8,3.627 1.83,3.701 1.887,3.757 1.96,3.787 2,3.787 2.525,3.787 2.565,3.787 2.638,3.757 2.695,3.701 2.725,3.627 2.725,3.587 2.725,2.963 2.725,2.923 2.695,2.849 2.638,2.793 2.565,2.762 2.525,2.762 2,2.762 1.96,2.762 1.887,2.793 1.83,2.849 1.8,2.923 1.8,2.962
  region: -2.9,0.9 -2.875,0.9 -2.829,0.881 -2.794,0.846 -2.775,0.8 -2.775,0.775 -2.775,-0.8 -2.775,-0.82 -2.79,-0.857 -2.818,-0.885 -2.855,-0.9 -2.875,-0.9 -4.675,-0.9 -4.695,-0.9 -4.732,-0.885 -4.76,-0.857 -4.775,-0.82 -4.775,-0.8 -4.775,0.8 -4.775,0.82 -4.76,0.857 -4.732,0.885 -4.695,0.9 -4.675,0.9
  region: 2.9,-0.9 2.875,-0.9 2.829,-0.881 2.794,-0.846 2.775,-0.8 2.775,-0.775 2.775,0.8 2.775,0.82 2.79,0.857 2.818,0.885 2.855,0.9 2.875,0.9 4.675,0.9 4.695,0.9 4.732,0.885 4.76,0.857 4.775,0.82 4.775,0.8 4.775,-0.8 4.775,-0.82 4.76,-0.857 4.732,-0.885 4.695,-0.9 4.675,-0.9
Top Component Outline:
  lines w0.05: -4.5,-1.33 -4.5,-2.64 4.5,-2.64 4.5,-1.33 ; -4.5,-1.33 4.5,-1.33 ; -4.5,-1.33 -4.639,-1.33 -5.135,-0.834 -5.135,0.834 -4.5,1.469 -4.5,4.064 4.5,4.064 4.5,1.469 5.135,0.834 5.135,-0.834 4.639,-1.33 4.5,-1.33
  text "PCB Edge" at -1.175,-2.1 h0.7
Top 3D Body:
  lines w0.01: -4,-2.515 -3.825,-2.64 -3.45,-2.04 -3.24,-2.04 -3.24,-2.64 3.24,-2.64 3.24,-2.04 3.45,-2.04 3.825,-2.64 4,-2.515 3.7,-2.04 3.7,2.97 -3.7,2.97 -3.7,-2.04 -4,-2.515
Top Component Center:
  circle w0.05: c0,0 r0.35
  lines w0.05: -0.5,0 0.5,0 ; 0,-0.5 0,0.5
Top Dimensions:
  lines w0.1: -4,-2.515 -3.825,-2.64 -3.45,-2.04 -3.24,-2.04 -3.24,-2.64 3.24,-2.64 3.24,-2.04 3.45,-2.04 3.825,-2.64 4,-2.515 3.7,-2.04 3.7,2.97 -3.7,2.97 -3.7,-2.04 -4,-2.515
Top Assembly:
  text ".Designator" at -1.778,4.318 h0.75
3D body "629105150921.stp": height 2.76, standoff -0.52, extent -4.3,-2.64 4.3,3.23

## CON-Wurth-693012040811 [mm]
pads (6):
  rrect15% 1.6x1.2 smd: 1(-11.75,-3.9) 2(-11.75,-1.36) 3(-11.75,1.18) 5(5.75,-3.9) 6(5.75,-1.36) 7(5.75,1.18)
Top Overlay:
  lines w0.2: -12.8,-8.9 12.4,-8.9 12.4,7.25 10.75,8.9 -12.8,8.9 -12.8,-8.9
Top Component Outline:
  lines w0.05: -12.8,-9.35 13.7,-9.35 13.7,9.35 -12.8,9.35 -12.8,-9.35
Top 3D Body:
  lines w0.01: -12.3,-8.8 12.3,-8.8 12.3,7.2 10.7,8.8 -12.3,8.8 -12.3,-8.8
Top Component Center:
  circle w0.05: c0,0 r0.35
  lines w0.05: -0.5,0 0.5,0 ; 0,-0.5 0,0.5
Top Dimensions:
  lines w0.1: -12.3,-8.8 12.3,-8.8 12.3,7.2 10.7,8.8 -12.3,8.8 -12.3,-8.8
Top Assembly:
  text ".Designator" at -6.5,9.8 h0.75
3D body "66379.stp": height 1.8, standoff -0.05, extent -12.3,-8.8 12.3,8.8

## CON-Wurth-693063020911 [mm]
pads (17):
  rrect20% 1x1.5 smd: 1(6.875,17.7) 2(4.375,17.7) 3(1.875,17.7) 4(-0.625,17.7) 5(-3.125,17.7) 6(-5.625,17.7) 7(-8.05,17.7) 8(-9.75,17.7) 9(9.375,17.7)
  rrect20% 0.7x1.5 smd: 10(-11.05,17.7) 11(-12.25,17.7)
  rrect15% 1.5x2.8 smd: S1(-13.65,1.4) S2(13.65,1.4) S3(-13.65,15.9) S4(11.45,15.9)
  round 1.1 hole 1.1 unplated: ""(-11.5,14.9)
  round 1.6 hole 1.6 unplated: ""(9.5,14.9)
Top Overlay:
  lines w0.2: -13.65,3.15 -13.65,14.122 ; -13.65,17.653 -12.979,17.653 ; -12.5,0 12.5,0 ; 10.262,17.653 11.45,17.653 ; 11.45,14.122 11.45,11.537 13.65,9.337 13.65,3.15
Keep-Out Layer:
  rectangle: -10.363,6.35 9.957,12.319
Top Component Outline:
  lines w0.05: -14.605,0 -14.605,18.796 14.605,18.796 14.605,0 -14.605,0
Top 3D Body:
  lines w0.01: -14,0.381 -14,18.131 11.811,18.131 11.811,10.668 14,8.479 14,0.381 -14,0.381
Top Component Center:
  circle w0.05: c0,0 r0.35
  lines w0.05: -0.5,0 0.5,0 ; 0,-0.5 0,0.5
Top Dimensions:
  lines w0.1: -14,0.381 -14,18.131 11.811,18.131 11.811,10.668 14,8.479 14,0.381 -14,0.381
Top Assembly:
  text ".Designator" at -13.995,19.152 h0.75
3D body "693063020911 (rev1).stp": height 2.8, standoff -0.85, extent -14,0.381 14,18.131

## D-Diodes-D3V3F4U10LP-7 [mm] "U-DFN2510-10 , 10-Leads, Body 1.01x2.51mm, Pitch 0.50mm, IPC Medium Density"
height 0.61
pads (10):
  rrect30% 0.625x0.25 smd mask+0.05: 1(-0.4,1) 2(-0.4,0.5) 4(-0.4,-0.5) 5(-0.4,-1) 6(0.4,-1) 7(0.4,-0.5) 9(0.4,0.5) 10(0.4,1)
  rrect30% 0.7x0.45 smd mask+0.05: 3(-0.375,0)
  rrect30% 0.575x0.45 smd mask+0.05: 8(0.425,0)
Top Overlay:
  circle w0.1: c-0.7,1.325 r0.05
Top Component Outline:
  region: -0.675,0.805 -0.025,1 -0.675,1.195
  lines w0.05: -0.8,-1.55 0.8,-1.55 0.8,1.55 -0.8,1.55 -0.8,-1.55
Top 3D Body:
  lines w0.001: -0.54,-1.29 -0.54,1.29 0.54,1.29 0.54,-1.29 -0.54,-1.29
Top Component Center:
  circle w0.05: c0,0 r0.35
  lines w0.05: -0.5,0 0.5,0 ; 0,-0.5 0,0.5
Top Dimensions:
  region: 0.15,1.18 -0.45,1 0.15,0.82
  lines w0.1: -0.54,-1.29 0.54,-1.29 0.54,1.29 -0.54,1.29 -0.54,-1.29
Top Assembly:
  text ".Designator" at -0.175,0.425 h0.75
3D body "D-Diodes-D3V3F4U10LP-7.step": height 0.61, standoff 0, extent -0.54,-1.29 0.54,1.29

## D-DIODES-SOD-923 [mm] "SOD-923, 2-Leads, Body 0.60x1.00mm, IPC Medium Density"
height 0.4
pads (2):
  rrect20% 0.4x0.6 smd mask+0.05: 1(-0.45,0) 2(0.45,0)
Top Component Outline:
  lines w0.05: -0.9,-0.5 -0.9,0.5 0.9,0.5 0.9,-0.5 -0.9,-0.5
Top 3D Body:
  lines w0.001: -0.5,-0.325 0.5,-0.325 0.5,0.325 -0.5,0.325 -0.5,-0.325
Top Component Center:
  circle w0.05: c0,0 r0.35
  lines w0.05: -0.5,0 0.5,0 ; 0,-0.5 0,0.5
Top Dimensions:
  lines w0.1: -0.5,-0.325 0.5,-0.325 0.5,0.325 -0.5,0.325 -0.5,-0.325
Top Assembly:
  text ".Designator" at -1.349,-0.135 h0.6
3D body "SODFL100X40-2N.step": height 0.4, standoff 0, extent -0.5,-0.325 0.5,0.325